# Altium schematic symbol library PTMA401120N2AS.SchLib: 1 symbol
Pins are listed as number, name and electrical type; pins without a type are passive.

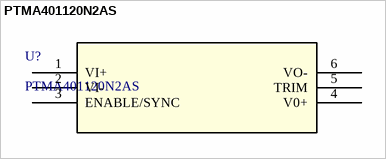
[diagram p0: symbol PTMA401120N2AS]

## PTMA401120N2AS
designator U?
No Description Available; Manufacturer_Name: Texas Instruments; Copyright: Copyright (C) 2026 Ultra Librarian. All rights reserved.; Manufacturer_Part_Number: PTMA401120N2AS; RefDes: RefDes; Type: Type
footprint EET6
pins: 1 VI+, 2 VI-, 3 ENABLE/SYNC, 4 V0+, 5 TRIM, 6 VO-